# Altium footprint library PcbLib1.PcbLib: 3 footprints
Each footprint in its own frame and in the unit in brackets; x right, y up, seen from the top. Pads: shape width x height; smd on the part's side, far side on the other; paste and mask are expansions set on the pad; w line width, h text height; cw(c..) or ccw(c..) is an arc to the next point about the centre after c.
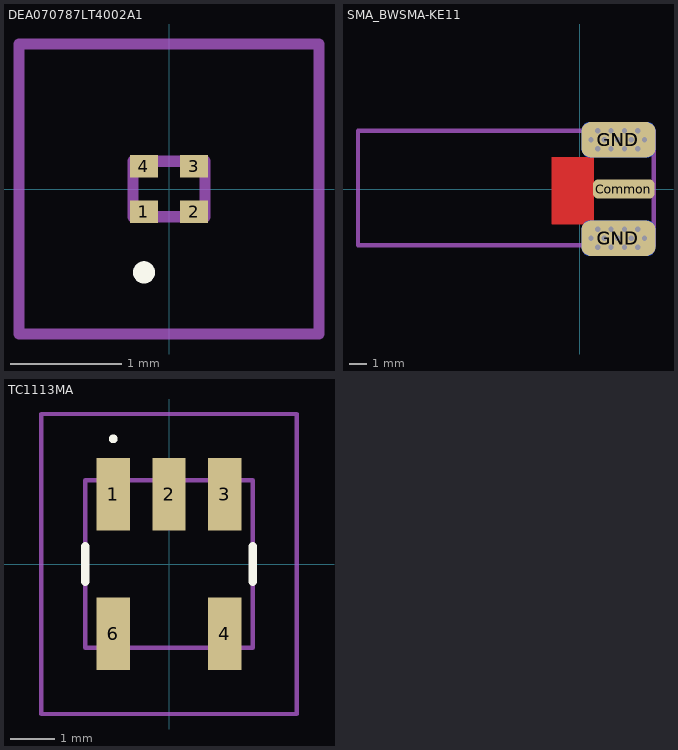
[diagram p0: the footprints below, top view; thin cyan lines are the x and y axes]

## DEA070787LT4002A1 [mm]
pads (4):
  rect 0.25x0.2 smd: 1(-0.225,-0.205) 2(0.225,-0.205) 3(0.225,0.205) 4(-0.225,0.205)
Top Overlay:
  lines w0.1: -0.225,-0.8 ccw(c-0.225,-0.75) -0.225,-0.7 ccw(c-0.225,-0.75) -0.225,-0.8
Mechanical 15:
  lines w0.1: -0.325,-0.25 0.325,-0.25 0.325,0.25 -0.325,0.25 -0.325,-0.25
Mechanical 20:
  lines w0.1: -1.35,-1.305 1.35,-1.305 1.35,1.305 -1.35,1.305 -1.35,-1.305

## SMA_BWSMA-KE11 [mm]
pads (5):
  rrect50% 3.5x1.082 smd: Common(2.5,0)
  rrect50% 4.2x2 smd: GND(2.2,-2.8) GND(2.2,2.8)
  rrect50% 4.2x2 smd far side: GND(2.2,-2.8) GND(2.2,2.8)
via 3.302,3.302 diameter 0.45 hole 0.3
via 1.778,3.302 diameter 0.45 hole 0.3
via 1.016,3.302 diameter 0.45 hole 0.3
via 2.54,3.302 diameter 0.45 hole 0.3
via 1.397,2.794 diameter 0.45 hole 0.3
via 0.635,2.794 diameter 0.45 hole 0.3
via 2.159,2.794 diameter 0.45 hole 0.3
via 1.778,2.286 diameter 0.45 hole 0.3
via 1.016,2.286 diameter 0.45 hole 0.3
via 2.54,2.286 diameter 0.45 hole 0.3
via 2.921,2.794 diameter 0.45 hole 0.3
via 3.302,2.286 diameter 0.45 hole 0.3
via 3.683,2.794 diameter 0.45 hole 0.3
via 1.778,-2.286 diameter 0.45 hole 0.3
via 1.016,-2.286 diameter 0.45 hole 0.3
via 3.302,-2.286 diameter 0.45 hole 0.3
via 2.54,-2.286 diameter 0.45 hole 0.3
via 1.397,-2.794 diameter 0.45 hole 0.3
via 0.635,-2.794 diameter 0.45 hole 0.3
via 2.159,-2.794 diameter 0.45 hole 0.3
via 1.778,-3.302 diameter 0.45 hole 0.3
via 1.016,-3.302 diameter 0.45 hole 0.3
via 2.54,-3.302 diameter 0.45 hole 0.3
via 3.683,-2.794 diameter 0.45 hole 0.3
via 2.921,-2.794 diameter 0.45 hole 0.3
via 3.302,-3.302 diameter 0.45 hole 0.3
Top Layer:
  pour cut-out: 0.8,1.8 0.8,-2 -1.6,-2 -1.6,1.8
Mid-Layer 1:
  pour cut-out: -1.524,0.635 -1.524,-0.635 4.445,-0.635 4.445,0.635
Mechanical 1:
  lines w0.254: -12.6,-3.2 4.2,-3.2 4.2,3.3 -12.6,3.3 -12.6,-3.2
3D body "sma smd.step": height 3.7, standoff -2.8, extent -12.6,-3.25 4.2,3.25

## TC1113MA [mm]
pads (5):
  rect 0.76x1.65 smd: 1(-1.27,1.59) 2(0,1.59) 3(1.27,1.59) 4(1.27,-1.59) 6(-1.27,-1.59)
Top Overlay:
  lines w0.1: -1.27,2.8 ccw(c-1.27,2.85) -1.27,2.9 ccw(c-1.27,2.85) -1.27,2.8
  lines w0.2: -1.905,-0.4 -1.905,0.4 ; 1.905,-0.4 1.905,0.4
Mechanical 15:
  lines w0.1: -1.905,-1.905 1.905,-1.905 1.905,1.905 -1.905,1.905 -1.905,-1.905
Mechanical 20:
  lines w0.1: -2.905,-3.415 2.905,-3.415 2.905,3.415 -2.905,3.415 -2.905,-3.415